# Altium schematic symbol library HEF4071BP.SchLib: 1 symbol
Pins are listed as number, name and electrical type; pins without a type are passive.

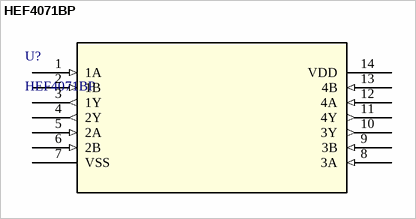
[diagram p0: symbol HEF4071BP]

## HEF4071BP
designator U?
No Description Available; Vendor: Nexperia; Manufacturer_Part_Number: HEF4071BP; Copyright: Copyright (C) 2016 Accelerated Designs. All rights reserved; RefDes: RefDes; Type: DEV; Value: Value
footprint SOT27-1
pins: 1 1A (in), 2 1B (in), 3 1Y (out), 4 2Y (out), 5 2A (in), 6 2B (in), 7 VSS (power), 8 3A (in), 9 3B (in), 10 3Y (out), 11 4Y (out), 12 4A (in), 13 4B (in), 14 VDD (power)